# EAGLE library part ISP1807-LR (library ISP1807LR_Int)
ISP Smart Bluetooth Module
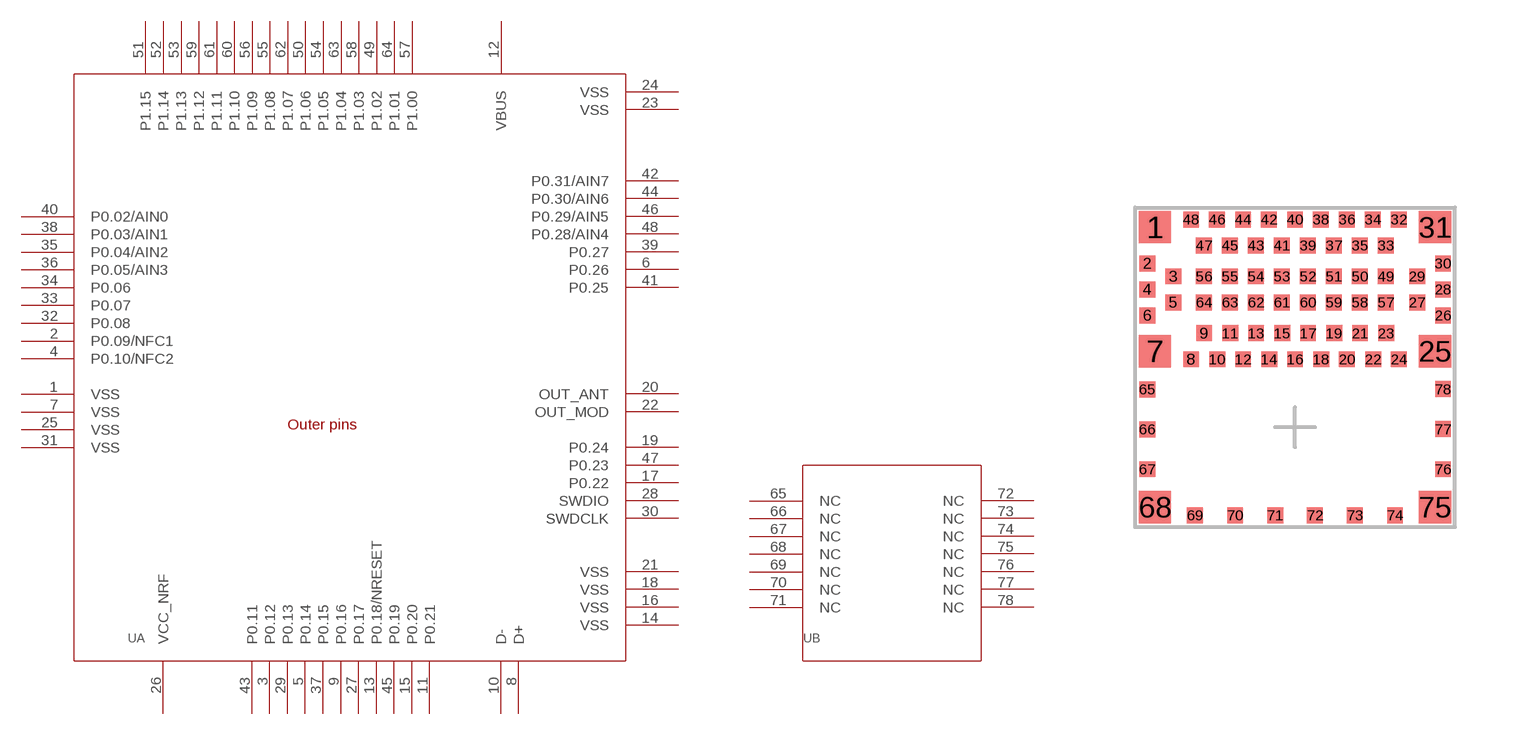
[diagram p0: symbol with the pads of ISP1807-LR; footprint ISP1807-LR]

Designator prefix U; gates A=ISP1807-LR_A B=ISP1807-LR_B

## ISP1807-LRISP1807-LR_ISP1807-LR (BOI: QFN 8 x 8; BOI-METRIC: QFN 8 x 8; DESIG: BLE Module; FAB: Insight SiP; ISP_PART: ISP1807; REF: ISP1807-LR)  [ISP1807-LR]
1  A:VSS  pwr
2  A:P0.09/NFC1
3  A:P0.12
4  A:P0.10/NFC2
5  A:P0.14
6  A:P0.26
7  A:VSS  pwr
8  A:D+  pwr
9  A:P0.16
10  A:D-  pwr
11  A:P0.21
12  A:VBUS  pwr
13  A:P0.18/NRESET
14  A:VSS  pwr
15  A:P0.20
16  A:VSS  pwr
17  A:P0.22
18  A:VSS  pwr
19  A:P0.24
20  A:OUT_ANT
21  A:VSS  pwr
22  A:OUT_MOD
23  A:VSS  pwr
24  A:VSS  pwr
25  A:VSS  pwr
26  A:VCC_NRF  pwr
27  A:P0.17
28  A:SWDIO
29  A:P0.13
30  A:SWDCLK  in
31  A:VSS  pwr
32  A:P0.08
33  A:P0.07
34  A:P0.06
35  A:P0.04/AIN2
36  A:P0.05/AIN3
37  A:P0.15
38  A:P0.03/AIN1
39  A:P0.27
40  A:P0.02/AIN0
41  A:P0.25
42  A:P0.31/AIN7
43  A:P0.11
44  A:P0.30/AIN6
45  A:P0.19
46  A:P0.29/AIN5
47  A:P0.23
48  A:P0.28/AIN4
49  A:P1.02
50  A:P1.06
51  A:P1.15
52  A:P1.14
53  A:P1.13
54  A:P1.05
55  A:P1.08
56  A:P1.09
57  A:P1.00
58  A:P1.03
59  A:P1.12
60  A:P1.10
61  A:P1.11
62  A:P1.07
63  A:P1.04
64  A:P1.01
65  B:NC  pas
66  B:NC  pas
67  B:NC  pas
68  B:NC  pas
69  B:NC  pas
70  B:NC  pas
71  B:NC  pas
72  B:NC  pas
73  B:NC  pas
74  B:NC  pas
75  B:NC  pas
76  B:NC  pas
77  B:NC  pas
78  B:NC  pas

## Footprint ISP1807-LR (pad centres in mm)
smd 0.8 x 0.8: 1 0.5,-0.5; 7 0.5,-3.6; 25 7.5,-3.6; 31 7.5,-0.5; 68 0.5,-7.5; 75 7.5,-7.5
smd 0.4 x 0.4: 2 0.3,-1.4; 3 0.95,-1.725; 4 0.3,-2.05; 5 0.95,-2.375; 6 0.3,-2.7; 8 1.4,-3.8; 9 1.725,-3.15; 10 2.05,-3.8; 11 2.375,-3.15; 12 2.7,-3.8; 13 3.025,-3.15; 14 3.35,-3.8; 15 3.675,-3.15; 16 4,-3.8; 17 4.325,-3.15; 18 4.65,-3.8; 19 4.975,-3.15; 20 5.3,-3.8; 21 5.625,-3.15; 22 5.95,-3.8; 23 6.275,-3.15; 24 6.6,-3.8; 26 7.7,-2.7; 27 7.05,-2.375; 28 7.7,-2.05; 29 7.05,-1.725; 30 7.7,-1.4; 32 6.6,-0.3; 33 6.275,-0.95; 34 5.95,-0.3; 35 5.625,-0.95; 36 5.3,-0.3; 37 4.975,-0.95; 38 4.65,-0.3; 39 4.325,-0.95; 40 4,-0.3; 41 3.675,-0.95; 42 3.35,-0.3; 43 3.025,-0.95; 44 2.7,-0.3; 45 2.375,-0.95; 46 2.05,-0.3; 47 1.725,-0.95; 48 1.4,-0.3; 49 6.275,-1.725; 50 5.625,-1.725; 51 4.975,-1.725; 52 4.325,-1.725; 53 3.675,-1.725; 54 3.025,-1.725; 55 2.375,-1.725; 56 1.725,-1.725; 57 6.275,-2.375; 58 5.625,-2.375; 59 4.975,-2.375; 60 4.325,-2.375; 61 3.675,-2.375; 62 3.025,-2.375; 63 2.375,-2.375; 64 1.725,-2.375; 65 0.3,-4.55; 66 0.3,-5.55; 67 0.3,-6.55; 69 1.5,-7.701; 70 2.5,-7.701; 71 3.5,-7.701; 72 4.5,-7.701; 73 5.5,-7.701; 74 6.5,-7.701; 76 7.7,-6.55; 77 7.7,-5.55; 78 7.7,-4.55